# Altium footprint library FootPrintLib_11.PcbLib: 376 footprints (part 9 of 24)
Each footprint in its own frame and in the unit in brackets; x right, y up, seen from the top. Pads: shape width x height; smd on the part's side, far side on the other; paste and mask are expansions set on the pad; w line width, h text height; cw(c..) or ccw(c..) is an arc to the next point about the centre after c.
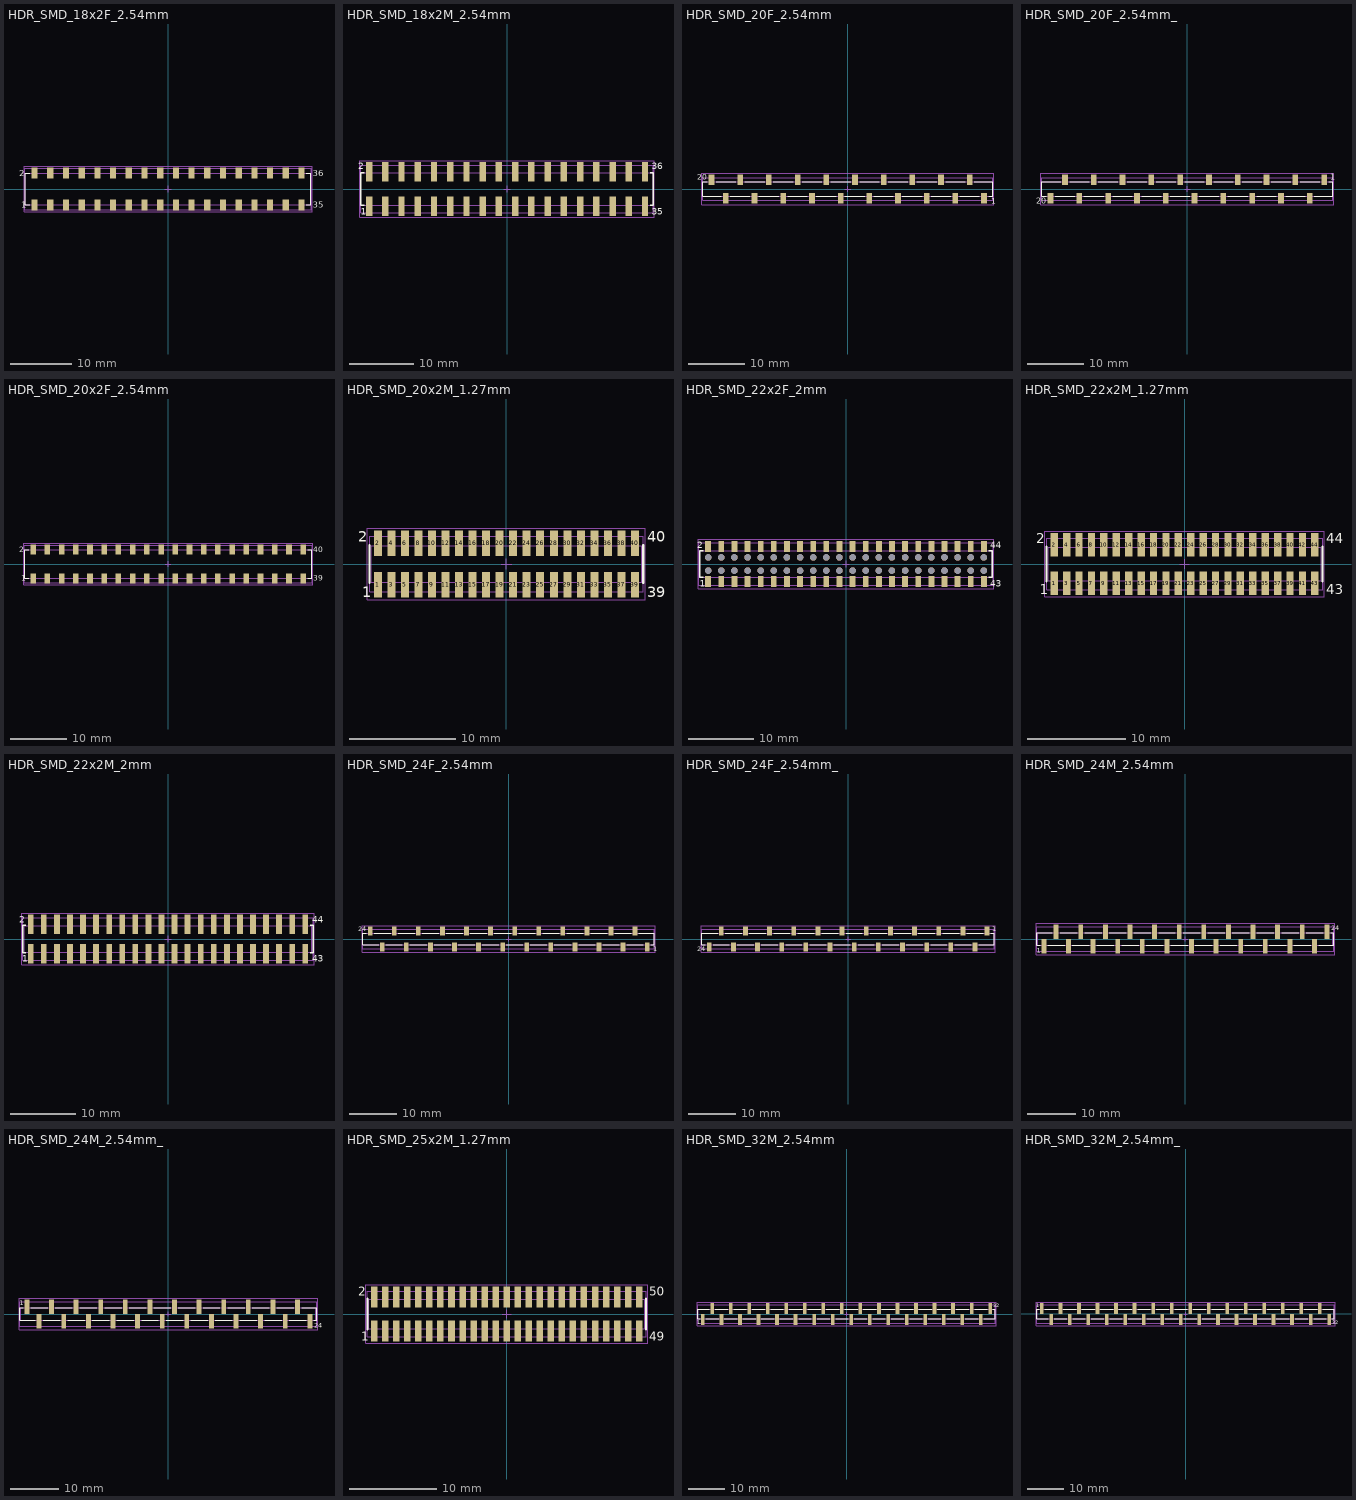
[diagram p8: the footprints below, top view; thin cyan lines are the x and y axes]

## HDR_SMD_18x2F_2.54mm [mm] "Socket Header, Pitch 2.54 mm, SMT, Vertical, dual row, 36p"
height 7.45
pads (36):
  rect 1x1.8 smd: 1(-21.59,-2.6) 2(-21.59,2.6) 3(-19.05,-2.6) 4(-19.05,2.6) 5(-16.51,-2.6) 6(-16.51,2.6) 7(-13.97,-2.6) 8(-13.97,2.6) 9(-11.43,-2.6) 10(-11.43,2.6) 11(-8.89,-2.6) 12(-8.89,2.6) 13(-6.35,-2.6) 14(-6.35,2.6) 15(-3.81,-2.6) 16(-3.81,2.6) 17(-1.27,-2.6) 18(-1.27,2.6) 19(1.27,-2.6) 20(1.27,2.6) 21(3.81,-2.6) 22(3.81,2.6) 23(6.35,-2.6) 24(6.35,2.6) 25(8.89,-2.6) 26(8.89,2.6) 27(11.43,-2.6) 28(11.43,2.6) 29(13.97,-2.6) 30(13.97,2.6) 31(16.51,-2.6) 32(16.51,2.6) 33(19.05,-2.6) 34(19.05,2.6) 35(21.59,-2.6) 36(21.59,2.6)
Top Overlay:
  lines w0.2: -22.37,-2.54 -23.11,-2.54 -23.11,2.54 -22.37,2.54 ; 22.37,-2.54 23.11,-2.54 23.11,2.54 22.37,2.54
  text "36" at 23.42,2.1 h1
  text "35" at 23.42,-3 h1
  text "2" at -24.12,2.1 h1
  text "1" at -23.72,-3 h1
Mechanical 11:
  lines w0.1: -23.11,-2.54 23.11,-2.54 23.11,2.54 -23.11,2.54 -23.11,-2.54
Mechanical 13:
  lines w0.1: -23.185,-3.35 23.185,-3.35 23.185,3.35 -23.185,3.35 -23.185,-3.35
Mechanical 15:
  lines w0.1: -0.5,0 0.5,0 ; 0,-0.5 0,0.5 ; -23.31,-3.7 23.31,-3.7 23.31,3.7 -23.31,3.7 -23.31,-3.7
3D body "61003621821.stp": height 7.5, standoff 0, extent -22.86,-3.35 22.86,3.35

## HDR_SMD_18x2M_2.54mm [mm] "Pin Header, pitch 2.54 mm, SMD, Vertical, dual row, 36p"
height 9.6
pads (36):
  rect 1x3.1 smd: 1(-21.59,-2.7) 2(-21.59,2.7) 3(-19.05,-2.7) 4(-19.05,2.7) 5(-16.51,-2.7) 6(-16.51,2.7) 7(-13.97,-2.7) 8(-13.97,2.7) 9(-11.43,-2.7) 10(-11.43,2.7) 11(-8.89,-2.7) 12(-8.89,2.7) 13(-6.35,-2.7) 14(-6.35,2.7) 15(-3.81,-2.7) 16(-3.81,2.7) 17(-1.27,-2.7) 18(-1.27,2.7) 19(1.27,-2.7) 20(1.27,2.7) 21(3.81,-2.7) 22(3.81,2.7) 23(6.35,-2.7) 24(6.35,2.7) 25(8.89,-2.7) 26(8.89,2.7) 27(11.43,-2.7) 28(11.43,2.7) 29(13.97,-2.7) 30(13.97,2.7) 31(16.51,-2.7) 32(16.51,2.7) 33(19.05,-2.7) 34(19.05,2.7) 35(21.59,-2.7) 36(21.59,2.7)
Top Overlay:
  lines w0.2: -22.37,-2.54 -22.86,-2.54 -22.86,2.54 -22.37,2.54 ; 22.37,-2.54 22.86,-2.54 22.86,2.54 22.37,2.54
  text "1" at -22.92,-4 h1
  text "2" at -23.32,3.1 h1
  text "35" at 22.62,-4 h1
  text "36" at 22.62,3.1 h1
Mechanical 11:
  lines w0.1: -22.86,-2.54 22.86,-2.54 22.86,2.54 -22.86,2.54 -22.86,-2.54
Mechanical 13:
  lines w0.1: -22.86,-3.75 -22.86,3.75 22.86,3.75 22.86,-3.75 -22.86,-3.75
Mechanical 15:
  lines w0.1: -0.5,0 0.5,0 ; 0,-0.5 0,0.5 ; -23.06,-4.45 -23.06,4.45 23.06,4.45 23.06,-4.45 -23.06,-4.45
3D body "61003621121.stp": height 9.62, standoff 0.02, extent -22.86,-3.75 22.86,3.75

## HDR_SMD_20F_2.54mm [mm] "Socket Header, Pitch 2.54 mm, SMT, Vertical, single row, 20p"
height 7.5
pads (20):
  rect 1x1.91 smd: 1(24.13,-1.645) 2(21.59,1.645) 3(19.05,-1.645) 4(16.51,1.645) 5(13.97,-1.645) 6(11.43,1.645) 7(8.89,-1.645) 8(6.35,1.645) 9(3.81,-1.645) 10(1.27,1.645) 11(-1.27,-1.645) 12(-3.81,1.645) 13(-6.35,-1.645) 14(-8.89,1.645) 15(-11.43,-1.645) 16(-13.97,1.645) 17(-16.51,-1.645) 18(-19.05,1.645) 19(-21.59,-1.645) 20(-24.13,1.645)
Top Overlay:
  lines w0.2: -24.92,1.25 -25.65,1.25 -25.65,-1.25 -22.37,-1.25 ; -23.32,1.25 -19.82,1.25 ; -20.82,-1.25 -17.32,-1.25 ; -18.24,1.25 -14.74,1.25 ; -15.74,-1.25 -12.24,-1.25 ; -13.16,1.25 -9.66,1.25 ; -10.66,-1.25 -7.16,-1.25 ; -8.08,1.25 -4.58,1.25 ; -5.58,-1.25 -2.08,-1.25 ; -3,1.25 0.5,1.25 ; -0.5,-1.25 3,-1.25 ; 2.08,1.25 5.58,1.25 ; 4.58,-1.25 8.08,-1.25 ; 7.16,1.25 10.66,1.25 ; 9.66,-1.25 13.16,-1.25 ; 12.24,1.25 15.74,1.25 ; 14.74,-1.25 18.24,-1.25 ; 17.32,1.25 20.82,1.25 ; 19.82,-1.25 23.32,-1.25 ; 22.37,1.25 25.65,1.25 25.65,-1.25 24.92,-1.25
  text "20" at -26.7,1.6 h1
  text "1" at 25.42,-2.6 h1
Mechanical 11:
  lines w0.1: -25.65,-1.25 25.65,-1.25 25.65,1.25 -25.65,1.25 -25.65,-1.25
Mechanical 13:
  lines w0.1: -25.65,-2.025 25.65,-2.025 25.65,2.025 -25.65,2.025 -25.65,-2.025
Mechanical 15:
  lines w0.1: -0.5,0 0.5,0 ; 0,-0.5 0,0.5 ; -25.85,-2.8 25.85,-2.8 25.85,2.8 -25.85,2.8 -25.85,-2.8
3D body "61002011921.stp": height 7.5, standoff 0, extent -25.65,-2.025 25.65,2.025

## HDR_SMD_20F_2.54mm_ [mm] "Socket Header, Pitch 2.54 mm, SMT, Vertical, single row, 20p"
height 7.5
pads (20):
  rect 1x1.91 smd: 1(24.13,1.645) 2(21.59,-1.645) 3(19.05,1.645) 4(16.51,-1.645) 5(13.97,1.645) 6(11.43,-1.645) 7(8.89,1.645) 8(6.35,-1.645) 9(3.81,1.645) 10(1.27,-1.645) 11(-1.27,1.645) 12(-3.81,-1.645) 13(-6.35,1.645) 14(-8.89,-1.645) 15(-11.43,1.645) 16(-13.97,-1.645) 17(-16.51,1.645) 18(-19.05,-1.645) 19(-21.59,1.645) 20(-24.13,-1.645)
Top Overlay:
  lines w0.2: -24.92,-1.25 -25.65,-1.25 -25.65,1.25 -22.37,1.25 ; -23.32,-1.25 -19.87,-1.25 ; -20.77,1.25 -17.32,1.25 ; -18.24,-1.25 -14.79,-1.25 ; -15.69,1.25 -12.24,1.25 ; -13.16,-1.25 -9.71,-1.25 ; -10.61,1.25 -7.16,1.25 ; -8.08,-1.25 -4.63,-1.25 ; -5.53,1.25 -2.08,1.25 ; -3,-1.25 0.45,-1.25 ; -0.45,1.25 3,1.25 ; 2.08,-1.25 5.53,-1.25 ; 4.63,1.25 8.08,1.25 ; 7.16,-1.25 10.61,-1.25 ; 9.71,1.25 13.16,1.25 ; 12.24,-1.25 15.69,-1.25 ; 14.79,1.25 18.24,1.25 ; 17.32,-1.25 20.77,-1.25 ; 19.87,1.25 23.32,1.25 ; 22.37,-1.25 25.65,-1.25 25.65,1.25 24.92,1.25
  text "20" at -26.7,-2.6 h1
  text "1" at 25.22,1.6 h1
Mechanical 11:
  lines w0.1: -25.65,-1.25 -25.65,1.25 25.65,1.25 25.65,-1.25 -25.65,-1.25
Mechanical 13:
  lines w0.1: -25.65,-2.025 25.65,-2.025 25.65,2.025 -25.65,2.025 -25.65,-2.025
Mechanical 15:
  lines w0.1: -0.5,0 0.5,0 ; 0,-0.5 0,0.5 ; -25.85,-2.8 25.85,-2.8 25.85,2.8 -25.85,2.8 -25.85,-2.8
3D body "61002013321.stp": height 7.5, standoff 0, extent -25.65,-2.025 25.65,2.025

## HDR_SMD_20x2F_2.54mm [mm] "Socket Header, Pitch 2.54 mm, SMT, Vertical, dual row, 40p"
height 7.45
pads (40):
  rect 1x1.8 smd: 1(-24.13,-2.6) 2(-24.13,2.6) 3(-21.59,-2.6) 4(-21.59,2.6) 5(-19.05,-2.6) 6(-19.05,2.6) 7(-16.51,-2.6) 8(-16.51,2.6) 9(-13.97,-2.6) 10(-13.97,2.6) 11(-11.43,-2.6) 12(-11.43,2.6) 13(-8.89,-2.6) 14(-8.89,2.6) 15(-6.35,-2.6) 16(-6.35,2.6) 17(-3.81,-2.6) 18(-3.81,2.6) 19(-1.27,-2.6) 20(-1.27,2.6) 21(1.27,-2.6) 22(1.27,2.6) 23(3.81,-2.6) 24(3.81,2.6) 25(6.35,-2.6) 26(6.35,2.6) 27(8.89,-2.6) 28(8.89,2.6) 29(11.43,-2.6) 30(11.43,2.6) 31(13.97,-2.6) 32(13.97,2.6) 33(16.51,-2.6) 34(16.51,2.6) 35(19.05,-2.6) 36(19.05,2.6) 37(21.59,-2.6) 38(21.59,2.6) 39(24.13,-2.6) 40(24.13,2.6)
Top Overlay:
  lines w0.2: -24.91,-2.54 -25.65,-2.54 -25.65,2.54 -24.91,2.54 ; 24.91,-2.54 25.65,-2.54 25.65,2.54 24.91,2.54
  text "1" at -26.26,-3 h1
  text "2" at -26.66,2.1 h1
  text "39" at 25.96,-3 h1
  text "40" at 25.96,2.1 h1
Mechanical 11:
  lines w0.1: -25.65,-2.54 -25.65,2.54 25.65,2.54 25.65,-2.54 -25.65,-2.54
Mechanical 13:
  lines w0.1: -25.725,-3.35 -25.725,3.35 25.725,3.35 25.725,-3.35 -25.725,-3.35
Mechanical 15:
  lines w0.1: -0.5,0 0.5,0 ; 0,-0.5 0,0.5 ; -25.85,-3.7 -25.85,3.7 25.85,3.7 25.85,-3.7 -25.85,-3.7
3D body "61004021821.stp": height 7.5, standoff 0, extent -25.4,-3.35 25.4,3.35

## HDR_SMD_20x2M_1.27mm [mm] "Pin Header, pitch 1.27 mm, SMD, Vertical, dual row, 40p"
height 6.1
pads (40):
  rect 0.75x2.4 smd: 1(-12.065,-1.95) 2(-12.065,1.95) 3(-10.795,-1.95) 4(-10.795,1.95) 5(-9.525,-1.95) 6(-9.525,1.95) 7(-8.255,-1.95) 8(-8.255,1.95) 9(-6.985,-1.95) 10(-6.985,1.95) 11(-5.715,-1.95) 12(-5.715,1.95) 13(-4.445,-1.95) 14(-4.445,1.95) 15(-3.175,-1.95) 16(-3.175,1.95) 17(-1.905,-1.95) 18(-1.905,1.95) 19(-0.635,-1.95) 20(-0.635,1.95) 21(0.635,-1.95) 22(0.635,1.95) 23(1.905,-1.95) 24(1.905,1.95) 25(3.175,-1.95) 26(3.175,1.95) 27(4.445,-1.95) 28(4.445,1.95) 29(5.715,-1.95) 30(5.715,1.95) 31(6.985,-1.95) 32(6.985,1.95) 33(8.255,-1.95) 34(8.255,1.95) 35(9.525,-1.95) 36(9.525,1.95) 37(10.795,-1.95) 38(10.795,1.95) 39(12.065,-1.95) 40(12.065,1.95)
Top Overlay:
  lines w0.2: -12.85,-1.775 -12.85,1.775 ; 12.85,-1.775 12.85,1.775
  text "40" at 13.23,2.1 h1
  text "39" at 13.23,-3.1 h1
  text "1" at -13.53,-3.1 h1
  text "2" at -13.93,2.1 h1
Mechanical 11:
  lines w0.1: -12.7,-1.7 -12.7,1.7 12.7,1.7 12.7,-1.7 -12.7,-1.7
Mechanical 13:
  lines w0.1: -12.85,-2.625 12.85,-2.625 12.85,2.625 -12.85,2.625 -12.85,-2.625
Mechanical 15:
  lines w0.1: -0.5,0 0.5,0 ; 0,-0.5 0,0.5 ; -13.05,-3.35 13.05,-3.35 13.05,3.35 -13.05,3.35 -13.05,-3.35
3D body "62134021021.stp": height 5.9, standoff 0, extent -12.7,-2.55 12.7,2.55

## HDR_SMD_22x2F_2mm [mm] "Socket Header, Pitch 2.00 mm, SMT, Vertical, dual row, 44p"
height 4.85
pads (88):
  rect 0.89x1.65 smd: 1(-21,-2.65) 2(-21,2.65) 3(-19,-2.65) 4(-19,2.65) 5(-17,-2.65) 6(-17,2.65) 7(-15,-2.65) 8(-15,2.65) 9(-13,-2.65) 10(-13,2.65) 11(-11,-2.65) 12(-11,2.65) 13(-9,-2.65) 14(-9,2.65) 15(-7,-2.65) 16(-7,2.65) 17(-5,-2.65) 18(-5,2.65) 19(-3,-2.65) 20(-3,2.65) 21(-1,-2.65) 22(-1,2.65) 23(1,-2.65) 24(1,2.65) 25(3,-2.65) 26(3,2.65) 27(5,-2.65) 28(5,2.65) 29(7,-2.65) 30(7,2.65) 31(9,-2.65) 32(9,2.65) 33(11,-2.65) 34(11,2.65) 35(13,-2.65) 36(13,2.65) 37(15,-2.65) 38(15,2.65) 39(17,-2.65) 40(17,2.65) 41(19,-2.65) 42(19,2.65) 43(21,-2.65) 44(21,2.65)
  round 1 hole 1 unplated: M1(-21,-1) M2(-21,1) M3(-19,-1) M4(-19,1) M5(-17,-1) M6(-17,1) M7(-15,-1) M8(-15,1) M9(-13,-1) M10(-13,1) M11(-11,-1) M12(-11,1) M13(-9,-1) M14(-9,1) M15(-7,-1) M16(-7,1) M17(-5,-1) M18(-5,1) M19(-3,-1) M20(-3,1) M21(-1,-1) M22(-1,1) M23(1,-1) M24(1,1) M25(3,-1) M26(3,1) M27(5,-1) M28(5,1) M29(7,-1) M30(7,1) M31(9,-1) M32(9,1) M33(11,-1) M34(11,1) M35(13,-1) M36(13,1) M37(15,-1) M38(15,1) M39(17,-1) M40(17,1) M41(19,-1) M42(19,1) M43(21,-1) M44(21,1)
Top Overlay:
  lines w0.2: -21.75,-2 -22.3,-2 -22.3,2 -21.75,2 ; 21.75,-2 22.3,-2 22.3,2 21.75,2
  text "1" at -22.3,-3.5 h1
  text "2" at -22.7,2.4 h1
  text "43" at 22,-3.5 h1
  text "44" at 22,2.4 h1
Mechanical 11:
  lines w0.1: -22.3,-2 -22.3,2 22.3,2 22.3,-2 -22.3,-2
Mechanical 13:
  lines w0.1: -22.45,-3.225 -22.45,3.225 22.45,3.225 22.45,-3.225 -22.45,-3.225
Mechanical 15:
  lines w0.1: -0.5,0 0.5,0 ; 0,-0.5 0,0.5 ; -22.5,-3.734 -22.5,3.734 22.5,3.734 22.5,-3.734 -22.5,-3.734
3D body "621344242921.stp": height 4.6, standoff 0, extent -22.25,-3.1 22.25,3.1

## HDR_SMD_22x2M_1.27mm [mm] "Pin Header, pitch 1.27 mm, SMD, Vertical, dual row, 44p"
height 6.1
pads (44):
  rect 0.75x2.4 smd: 1(-13.335,-1.95) 2(-13.335,1.95) 3(-12.065,-1.95) 4(-12.065,1.95) 5(-10.795,-1.95) 6(-10.795,1.95) 7(-9.525,-1.95) 8(-9.525,1.95) 9(-8.255,-1.95) 10(-8.255,1.95) 11(-6.985,-1.95) 12(-6.985,1.95) 13(-5.715,-1.95) 14(-5.715,1.95) 15(-4.445,-1.95) 16(-4.445,1.95) 17(-3.175,-1.95) 18(-3.175,1.95) 19(-1.905,-1.95) 20(-1.905,1.95) 21(-0.635,-1.95) 22(-0.635,1.95) 23(0.635,-1.95) 24(0.635,1.95) 25(1.905,-1.95) 26(1.905,1.95) 27(3.175,-1.95) 28(3.175,1.95) 29(4.445,-1.95) 30(4.445,1.95) 31(5.715,-1.95) 32(5.715,1.95) 33(6.985,-1.95) 34(6.985,1.95) 35(8.255,-1.95) 36(8.255,1.95) 37(9.525,-1.95) 38(9.525,1.95) 39(10.795,-1.95) 40(10.795,1.95) 41(12.065,-1.95) 42(12.065,1.95) 43(13.335,-1.95) 44(13.335,1.95)
Top Overlay:
  lines w0.2: -14.12,-1.775 -14.12,1.775 ; 14.12,-1.775 14.12,1.775
  text "2" at -15.2,2.1 h1
  text "1" at -14.8,-3.1 h1
  text "43" at 14.5,-3.1 h1
  text "44" at 14.5,2.1 h1
Mechanical 11:
  lines w0.1: -13.97,-1.7 13.97,-1.7 13.97,1.7 -13.97,1.7 -13.97,-1.7
Mechanical 13:
  lines w0.1: -14.12,-2.625 -14.12,2.625 14.12,2.625 14.12,-2.625 -14.12,-2.625
Mechanical 15:
  lines w0.1: -0.5,0 0.5,0 ; 0,-0.5 0,0.5 ; -14.32,-3.35 -14.32,3.35 14.32,3.35 14.32,-3.35 -14.32,-3.35
3D body "62134421021.stp": height 5.9, standoff 0, extent -13.97,-2.55 13.97,2.55

## HDR_SMD_22x2M_2mm [mm] "Pin Header, pitch 2.00 mm, SMD, Vertical, dual row, 44p"
height 6.8
pads (44):
  rect 0.89x3 smd: 1(-21,-2.25) 2(-21,2.25) 3(-19,-2.25) 4(-19,2.25) 5(-17,-2.25) 6(-17,2.25) 7(-15,-2.25) 8(-15,2.25) 9(-13,-2.25) 10(-13,2.25) 11(-11,-2.25) 12(-11,2.25) 13(-9,-2.25) 14(-9,2.25) 15(-7,-2.25) 16(-7,2.25) 17(-5,-2.25) 18(-5,2.25) 19(-3,-2.25) 20(-3,2.25) 21(-1,-2.25) 22(-1,2.25) 23(1,-2.25) 24(1,2.25) 25(3,-2.25) 26(3,2.25) 27(5,-2.25) 28(5,2.25) 29(7,-2.25) 30(7,2.25) 31(9,-2.25) 32(9,2.25) 33(11,-2.25) 34(11,2.25) 35(13,-2.25) 36(13,2.25) 37(15,-2.25) 38(15,2.25) 39(17,-2.25) 40(17,2.25) 41(19,-2.25) 42(19,2.25) 43(21,-2.25) 44(21,2.25)
Top Overlay:
  lines w0.2: -21.75,-2.075 -22.2,-2.075 -22.2,2.075 -21.75,2.075 ; 21.75,-2.075 22.2,-2.075 22.2,2.075 21.75,2.075
  text "2" at -22.8,2.5 h1
  text "1" at -22.3,-3.5 h1
  text "44" at 22.1,2.5 h1
  text "43" at 22.1,-3.5 h1
Mechanical 11:
  lines w0.1: -22,-2 -22,2 22,2 22,-2 -22,-2
Mechanical 13:
  lines w0.1: -22.2,-3.225 22.2,-3.225 22.2,3.225 -22.2,3.225 -22.2,-3.225
Mechanical 15:
  lines w0.1: -0.5,0 0.5,0 ; 0,-0.5 0,0.5 ; -22.4,-3.95 22.4,-3.95 22.4,3.95 -22.4,3.95 -22.4,-3.95
3D body "62134421921.stp": height 6.7, standoff 0, extent -22,-3.1 22,3.1

## HDR_SMD_24F_2.54mm [mm] "Socket Header, Pitch 2.54 mm, SMT, Vertical, single row, 24p"
height 7.5
pads (24):
  rect 1x1.91 smd: 1(29.21,-1.645) 2(26.67,1.645) 3(24.13,-1.645) 4(21.59,1.645) 5(19.05,-1.645) 6(16.51,1.645) 7(13.97,-1.645) 8(11.43,1.645) 9(8.89,-1.645) 10(6.35,1.645) 11(3.81,-1.645) 12(1.27,1.645) 13(-1.27,-1.645) 14(-3.81,1.645) 15(-6.35,-1.645) 16(-8.89,1.645) 17(-11.43,-1.645) 18(-13.97,1.645) 19(-16.51,-1.645) 20(-19.05,1.645) 21(-21.59,-1.645) 22(-24.13,1.645) 23(-26.67,-1.645) 24(-29.21,1.645)
Top Overlay:
  lines w0.2: -30,1.25 -30.73,1.25 -30.73,-1.25 -27.45,-1.25 ; -28.4,1.25 -24.9,1.25 ; -25.9,-1.25 -22.4,-1.25 ; -23.32,1.25 -19.82,1.25 ; -20.82,-1.25 -17.32,-1.25 ; -18.24,1.25 -14.74,1.25 ; -15.74,-1.25 -12.24,-1.25 ; -13.16,1.25 -9.66,1.25 ; -10.66,-1.25 -7.16,-1.25 ; -8.08,1.25 -4.58,1.25 ; -5.58,-1.25 -2.08,-1.25 ; -3,1.25 0.5,1.25 ; -0.5,-1.25 3,-1.25 ; 2.08,1.25 5.58,1.25 ; 4.58,-1.25 8.08,-1.25 ; 7.16,1.25 10.66,1.25 ; 9.66,-1.25 13.16,-1.25 ; 12.24,1.25 15.74,1.25 ; 14.74,-1.25 18.24,-1.25 ; 17.32,1.25 20.82,1.25 ; 19.82,-1.25 23.32,-1.25 ; 22.4,1.25 25.9,1.25 ; 24.9,-1.25 28.4,-1.25 ; 27.45,1.25 30.73,1.25 30.73,-1.25 30,-1.25
  text "24" at -31.78,1.6 h1
  text "1" at 30.5,-2.6 h1
Mechanical 11:
  lines w0.1: -30.73,-1.25 -30.73,1.25 30.73,1.25 30.73,-1.25 -30.73,-1.25
Mechanical 13:
  lines w0.1: -30.73,-2.025 -30.73,2.025 30.73,2.025 30.73,-2.025 -30.73,-2.025
Mechanical 15:
  lines w0.1: -0.5,0 0.5,0 ; 0,-0.5 0,0.5 ; -30.93,-2.8 -30.93,2.8 30.93,2.8 30.93,-2.8 -30.93,-2.8
3D body "61002411921.stp": height 7.5, standoff 0, extent -30.73,-2.025 30.73,2.025

## HDR_SMD_24F_2.54mm_ [mm] "Socket Header, Pitch 2.54 mm, SMT, Vertical, single row, 24p"
height 7.5
pads (24):
  rect 1x1.91 smd: 1(29.21,1.645) 2(26.67,-1.645) 3(24.13,1.645) 4(21.59,-1.645) 5(19.05,1.645) 6(16.51,-1.645) 7(13.97,1.645) 8(11.43,-1.645) 9(8.89,1.645) 10(6.35,-1.645) 11(3.81,1.645) 12(1.27,-1.645) 13(-1.27,1.645) 14(-3.81,-1.645) 15(-6.35,1.645) 16(-8.89,-1.645) 17(-11.43,1.645) 18(-13.97,-1.645) 19(-16.51,1.645) 20(-19.05,-1.645) 21(-21.59,1.645) 22(-24.13,-1.645) 23(-26.67,1.645) 24(-29.21,-1.645)
Top Overlay:
  lines w0.2: -30,-1.25 -30.73,-1.25 -30.73,1.25 -27.45,1.25 ; -28.4,-1.25 -24.95,-1.25 ; -25.85,1.25 -22.4,1.25 ; -23.32,-1.25 -19.87,-1.25 ; -20.77,1.25 -17.32,1.25 ; -18.24,-1.25 -14.79,-1.25 ; -15.69,1.25 -12.24,1.25 ; -13.16,-1.25 -9.71,-1.25 ; -10.61,1.25 -7.16,1.25 ; -8.08,-1.25 -4.63,-1.25 ; -5.53,1.25 -2.08,1.25 ; -3,-1.25 0.45,-1.25 ; -0.45,1.25 3,1.25 ; 2.08,-1.25 5.53,-1.25 ; 4.63,1.25 8.08,1.25 ; 7.16,-1.25 10.61,-1.25 ; 9.71,1.25 13.16,1.25 ; 12.24,-1.25 15.69,-1.25 ; 14.79,1.25 18.24,1.25 ; 17.32,-1.25 20.77,-1.25 ; 19.87,1.25 23.32,1.25 ; 22.4,-1.25 25.85,-1.25 ; 24.95,1.25 28.4,1.25 ; 27.45,-1.25 30.73,-1.25 30.73,1.25 30,1.25
  text "1" at 30.3,1.6 h1
  text "24" at -31.78,-2.6 h1
Mechanical 11:
  lines w0.1: -30.73,-1.25 30.73,-1.25 30.73,1.25 -30.73,1.25 -30.73,-1.25
Mechanical 13:
  lines w0.1: -30.73,-2.025 -30.73,2.025 30.73,2.025 30.73,-2.025 -30.73,-2.025
Mechanical 15:
  lines w0.1: -0.5,0 0.5,0 ; 0,-0.5 0,0.5 ; -30.93,-2.8 -30.93,2.8 30.93,2.8 30.93,-2.8 -30.93,-2.8
3D body "61002413321.stp": height 7.5, standoff 0, extent -30.73,-2.025 30.73,2.025

## HDR_SMD_24M_2.54mm [mm] "Pin Header, pitch 2.54 mm, SMD, Vertical, single row, 24p"
height 9.3
pads (24):
  rect 1x3 smd: 1(-29.21,-1.5) 2(-26.67,1.5) 3(-24.13,-1.5) 4(-21.59,1.5) 5(-19.05,-1.5) 6(-16.51,1.5) 7(-13.97,-1.5) 8(-11.43,1.5) 9(-8.89,-1.5) 10(-6.35,1.5) 11(-3.81,-1.5) 12(-1.27,1.5) 13(1.27,-1.5) 14(3.81,1.5) 15(6.35,-1.5) 16(8.89,1.5) 17(11.43,-1.5) 18(13.97,1.5) 19(16.51,-1.5) 20(19.05,1.5) 21(21.59,-1.5) 22(24.13,1.5) 23(26.67,-1.5) 24(29.21,1.5)
Top Overlay:
  lines w0.2: -30,-1.27 -30.63,-1.27 -30.63,1.27 -27.45,1.27 ; -28.4,-1.27 -24.9,-1.27 ; -25.86,1.27 -22.36,1.27 ; -23.32,-1.27 -19.82,-1.27 ; -20.78,1.27 -17.28,1.27 ; -18.24,-1.27 -14.74,-1.27 ; -15.7,1.27 -12.2,1.27 ; -13.16,-1.27 -9.66,-1.27 ; -10.62,1.27 -7.12,1.27 ; -8.08,-1.27 -4.58,-1.27 ; -5.54,1.27 -2.04,1.27 ; -3,-1.27 0.5,-1.27 ; -0.46,1.27 3.04,1.27 ; 2.08,-1.27 5.58,-1.27 ; 4.62,1.27 8.12,1.27 ; 7.16,-1.27 10.66,-1.27 ; 9.7,1.27 13.2,1.27 ; 12.24,-1.27 15.74,-1.27 ; 14.78,1.27 18.28,1.27 ; 17.32,-1.27 20.82,-1.27 ; 19.86,1.27 23.36,1.27 ; 22.4,-1.27 25.9,-1.27 ; 24.94,1.27 28.44,1.27 ; 27.5,-1.27 30.63,-1.27 30.63,1.27 30,1.27
  text "24" at 30.1,1.8 h1
  text "1" at -30.7,-2.8 h1
Mechanical 11:
  lines w0.1: -30.48,-1.27 30.48,-1.27 30.48,1.27 -30.48,1.27 -30.48,-1.27
Mechanical 13:
  lines w0.1: -30.63,-2.5 -30.63,2.5 30.63,2.5 30.63,-2.5 -30.63,-2.5
Mechanical 15:
  lines w0.1: -0.5,0 0.5,0 ; 0,-0.5 0,0.5 ; -30.83,-3.2 -30.83,3.2 30.83,3.2 30.83,-3.2 -30.83,-3.2
3D body "61002418221.stp": height 9.33, standoff 0, extent -30.48,-2.5 30.48,2.5

## HDR_SMD_24M_2.54mm_ [mm] "Pin Header, pitch 2.54 mm, SMD, Vertical, single row, 24p"
height 9.3
pads (24):
  rect 1x3 smd: 1(-29.21,1.5) 2(-26.67,-1.5) 3(-24.13,1.5) 4(-21.59,-1.5) 5(-19.05,1.5) 6(-16.51,-1.5) 7(-13.97,1.5) 8(-11.43,-1.5) 9(-8.89,1.5) 10(-6.35,-1.5) 11(-3.81,1.5) 12(-1.27,-1.5) 13(1.27,1.5) 14(3.81,-1.5) 15(6.35,1.5) 16(8.89,-1.5) 17(11.43,1.5) 18(13.97,-1.5) 19(16.51,1.5) 20(19.05,-1.5) 21(21.59,1.5) 22(24.13,-1.5) 23(26.67,1.5) 24(29.21,-1.5)
Top Overlay:
  lines w0.2: -30,1.27 -30.63,1.27 -30.63,-1.27 -27.45,-1.27 ; -28.4,1.27 -24.9,1.27 ; -25.86,-1.27 -22.36,-1.27 ; -23.32,1.27 -19.82,1.27 ; -20.78,-1.27 -17.28,-1.27 ; -18.24,1.27 -14.74,1.27 ; -15.7,-1.27 -12.2,-1.27 ; -13.16,1.27 -9.66,1.27 ; -10.62,-1.27 -7.12,-1.27 ; -8.08,1.27 -4.58,1.27 ; -5.54,-1.27 -2.04,-1.27 ; -3,1.27 0.5,1.27 ; -0.46,-1.27 3.04,-1.27 ; 2.08,1.27 5.58,1.27 ; 4.62,-1.27 8.12,-1.27 ; 7.16,1.27 10.66,1.27 ; 9.7,-1.27 13.2,-1.27 ; 12.24,1.27 15.74,1.27 ; 14.78,-1.27 18.28,-1.27 ; 17.32,1.27 20.82,1.27 ; 19.86,-1.27 23.36,-1.27 ; 22.4,1.27 25.9,1.27 ; 24.94,-1.27 28.44,-1.27 ; 27.5,1.27 30.63,1.27 30.63,-1.27 30,-1.27
  text "24" at 30.1,-2.8 h1
  text "1" at -30.7,1.8 h1
Mechanical 11:
  lines w0.1: -30.48,-1.27 -30.48,1.27 30.48,1.27 30.48,-1.27 -30.48,-1.27
Mechanical 13:
  lines w0.1: -30.63,-2.5 30.63,-2.5 30.63,2.5 -30.63,2.5 -30.63,-2.5
Mechanical 15:
  lines w0.1: -0.5,0 0.5,0 ; 0,-0.5 0,0.5 ; -30.83,-3.2 30.83,-3.2 30.83,3.2 -30.83,3.2 -30.83,-3.2
3D body "61002418321.stp": height 9.37, standoff 0.04, extent -30.48,-2.5 30.48,2.5

## HDR_SMD_25x2M_1.27mm [mm] "Pin Header, pitch 1.27 mm, SMD, Vertical, dual row, 50p"
height 6.1
pads (50):
  rect 0.75x2.4 smd: 1(-15.24,-1.95) 2(-15.24,1.95) 3(-13.97,-1.95) 4(-13.97,1.95) 5(-12.7,-1.95) 6(-12.7,1.95) 7(-11.43,-1.95) 8(-11.43,1.95) 9(-10.16,-1.95) 10(-10.16,1.95) 11(-8.89,-1.95) 12(-8.89,1.95) 13(-7.62,-1.95) 14(-7.62,1.95) 15(-6.35,-1.95) 16(-6.35,1.95) 17(-5.08,-1.95) 18(-5.08,1.95) 19(-3.81,-1.95) 20(-3.81,1.95) 21(-2.54,-1.95) 22(-2.54,1.95) 23(-1.27,-1.95) 24(-1.27,1.95) 25(0,-1.95) 26(0,1.95) 27(1.27,-1.95) 28(1.27,1.95) 29(2.54,-1.95) 30(2.54,1.95) 31(3.81,-1.95) 32(3.81,1.95) 33(5.08,-1.95) 34(5.08,1.95) 35(6.35,-1.95) 36(6.35,1.95) 37(7.62,-1.95) 38(7.62,1.95) 39(8.89,-1.95) 40(8.89,1.95) 41(10.16,-1.95) 42(10.16,1.95) 43(11.43,-1.95) 44(11.43,1.95) 45(12.7,-1.95) 46(12.7,1.95) 47(13.97,-1.95) 48(13.97,1.95) 49(15.24,-1.95) 50(15.24,1.95)
Top Overlay:
  lines w0.2: -16.025,-1.775 -16.025,1.775 ; 16.025,-1.775 16.025,1.775
  text "50" at 16.405,2.1 h1
  text "49" at 16.405,-3.1 h1
  text "1" at -16.705,-3.1 h1
  text "2" at -17.105,2.1 h1
Mechanical 11:
  lines w0.1: -15.875,-1.7 -15.875,1.7 15.875,1.7 15.875,-1.7 -15.875,-1.7
Mechanical 13:
  lines w0.1: -16.025,-2.625 16.025,-2.625 16.025,2.625 -16.025,2.625 -16.025,-2.625
Mechanical 15:
  lines w0.1: -0.5,0 0.5,0 ; 0,-0.5 0,0.5 ; -16.225,-3.35 16.225,-3.35 16.225,3.35 -16.225,3.35 -16.225,-3.35
3D body "62135021021.stp": height 5.9, standoff 0, extent -15.875,-2.55 15.875,2.55

## HDR_SMD_32M_2.54mm [mm] "Pin Header, pitch 2.54 mm, SMD, Vertical, single row, 32p"
height 9.3
pads (32):
  rect 1x3 smd: 1(-39.37,-1.5) 2(-36.83,1.5) 3(-34.29,-1.5) 4(-31.75,1.5) 5(-29.21,-1.5) 6(-26.67,1.5) 7(-24.13,-1.5) 8(-21.59,1.5) 9(-19.05,-1.5) 10(-16.51,1.5) 11(-13.97,-1.5) 12(-11.43,1.5) 13(-8.89,-1.5) 14(-6.35,1.5) 15(-3.81,-1.5) 16(-1.27,1.5) 17(1.27,-1.5) 18(3.81,1.5) 19(6.35,-1.5) 20(8.89,1.5) 21(11.43,-1.5) 22(13.97,1.5) 23(16.51,-1.5) 24(19.05,1.5) 25(21.59,-1.5) 26(24.13,1.5) 27(26.67,-1.5) 28(29.21,1.5) 29(31.75,-1.5) 30(34.29,1.5) 31(36.83,-1.5) 32(39.37,1.5)
Top Overlay:
  lines w0.2: -40.16,-1.27 -40.79,-1.27 -40.79,1.27 -37.61,1.27 ; -38.56,-1.27 -35.06,-1.27 ; -36.02,1.27 -32.52,1.27 ; -33.48,-1.27 -29.98,-1.27 ; -30.94,1.27 -27.44,1.27 ; -28.4,-1.27 -24.9,-1.27 ; -25.86,1.27 -22.36,1.27 ; -23.32,-1.27 -19.82,-1.27 ; -20.78,1.27 -17.28,1.27 ; -18.24,-1.27 -14.74,-1.27 ; -15.7,1.27 -12.2,1.27 ; -13.16,-1.27 -9.66,-1.27 ; -10.62,1.27 -7.12,1.27 ; -8.08,-1.27 -4.58,-1.27 ; -5.54,1.27 -2.04,1.27 ; -3,-1.27 0.5,-1.27 ; -0.46,1.27 3.04,1.27 ; 2.08,-1.27 5.58,-1.27 ; 4.62,1.27 8.12,1.27 ; 7.16,-1.27 10.66,-1.27 ; 9.7,1.27 13.2,1.27 ; 12.24,-1.27 15.74,-1.27 ; 14.78,1.27 18.28,1.27 ; 17.32,-1.27 20.82,-1.27 ; 19.86,1.27 23.36,1.27 ; 22.4,-1.27 25.9,-1.27 ; 24.94,1.27 28.44,1.27 ; 27.48,-1.27 30.98,-1.27 ; 30.02,1.27 33.52,1.27 ; 32.56,-1.27 36.06,-1.27 ; 35.1,1.27 38.6,1.27 ; 37.66,-1.27 40.79,-1.27 40.79,1.27 40.16,1.27
  text "1" at -40.86,-2.8 h1
  text "32" at 40.26,1.8 h1
Mechanical 11:
  lines w0.1: -40.64,-1.27 -40.64,1.27 40.64,1.27 40.64,-1.27 -40.64,-1.27
Mechanical 13:
  lines w0.1: -40.79,-2.5 40.79,-2.5 40.79,2.5 -40.79,2.5 -40.79,-2.5
Mechanical 15:
  lines w0.1: -0.5,0 0.5,0 ; 0,-0.5 0,0.5 ; -40.99,-3.2 40.99,-3.2 40.99,3.2 -40.99,3.2 -40.99,-3.2
3D body "61003218221.stp": height 9.33, standoff 0, extent -40.64,-2.5 40.64,2.5

## HDR_SMD_32M_2.54mm_ [mm] "Pin Header, pitch 2.54 mm, SMD, Vertical, single row, 32p"
height 9.3
pads (32):
  rect 1x3 smd: 1(-39.37,1.5) 2(-36.83,-1.5) 3(-34.29,1.5) 4(-31.75,-1.5) 5(-29.21,1.5) 6(-26.67,-1.5) 7(-24.13,1.5) 8(-21.59,-1.5) 9(-19.05,1.5) 10(-16.51,-1.5) 11(-13.97,1.5) 12(-11.43,-1.5) 13(-8.89,1.5) 14(-6.35,-1.5) 15(-3.81,1.5) 16(-1.27,-1.5) 17(1.27,1.5) 18(3.81,-1.5) 19(6.35,1.5) 20(8.89,-1.5) 21(11.43,1.5) 22(13.97,-1.5) 23(16.51,1.5) 24(19.05,-1.5) 25(21.59,1.5) 26(24.13,-1.5) 27(26.67,1.5) 28(29.21,-1.5) 29(31.75,1.5) 30(34.29,-1.5) 31(36.83,1.5) 32(39.37,-1.5)
Top Overlay:
  lines w0.2: -40.16,1.27 -40.79,1.27 -40.79,-1.27 -37.61,-1.27 ; -38.56,1.27 -35.06,1.27 ; -36.02,-1.27 -32.52,-1.27 ; -33.48,1.27 -29.98,1.27 ; -30.94,-1.27 -27.44,-1.27 ; -28.4,1.27 -24.9,1.27 ; -25.86,-1.27 -22.36,-1.27 ; -23.32,1.27 -19.82,1.27 ; -20.78,-1.27 -17.28,-1.27 ; -18.24,1.27 -14.74,1.27 ; -15.7,-1.27 -12.2,-1.27 ; -13.16,1.27 -9.66,1.27 ; -10.62,-1.27 -7.12,-1.27 ; -8.08,1.27 -4.58,1.27 ; -5.54,-1.27 -2.04,-1.27 ; -3,1.27 0.5,1.27 ; -0.46,-1.27 3.04,-1.27 ; 2.08,1.27 5.58,1.27 ; 4.62,-1.27 8.12,-1.27 ; 7.16,1.27 10.66,1.27 ; 9.7,-1.27 13.2,-1.27 ; 12.24,1.27 15.74,1.27 ; 14.78,-1.27 18.28,-1.27 ; 17.32,1.27 20.82,1.27 ; 19.86,-1.27 23.36,-1.27 ; 22.4,1.27 25.9,1.27 ; 24.94,-1.27 28.44,-1.27 ; 27.48,1.27 30.98,1.27 ; 30.02,-1.27 33.52,-1.27 ; 32.56,1.27 36.06,1.27 ; 35.1,-1.27 38.6,-1.27 ; 37.66,1.27 40.79,1.27 40.79,-1.27 40.16,-1.27
  text "32" at 40.26,-2.8 h1
  text "1" at -40.86,1.8 h1
Mechanical 11:
  lines w0.1: -40.64,-1.27 40.64,-1.27 40.64,1.27 -40.64,1.27 -40.64,-1.27
Mechanical 13:
  lines w0.1: -40.79,-2.5 -40.79,2.5 40.79,2.5 40.79,-2.5 -40.79,-2.5
Mechanical 15:
  lines w0.1: -0.5,0 0.5,0 ; 0,-0.5 0,0.5 ; -40.99,-3.2 -40.99,3.2 40.99,3.2 40.99,-3.2 -40.99,-3.2
3D body "61003218321.stp": height 9.37, standoff 0.04, extent -40.64,-2.5 40.64,2.5